# Altium footprint library HC_HC-FPC-0.5-8P-FH20.PcbLib: 1 footprints
Each footprint in its own frame and in the unit in brackets; x right, y up, seen from the top. Pads: shape width x height; smd on the part's side, far side on the other; paste and mask are expansions set on the pad; w line width, h text height; cw(c..) or ccw(c..) is an arc to the next point about the centre after c.
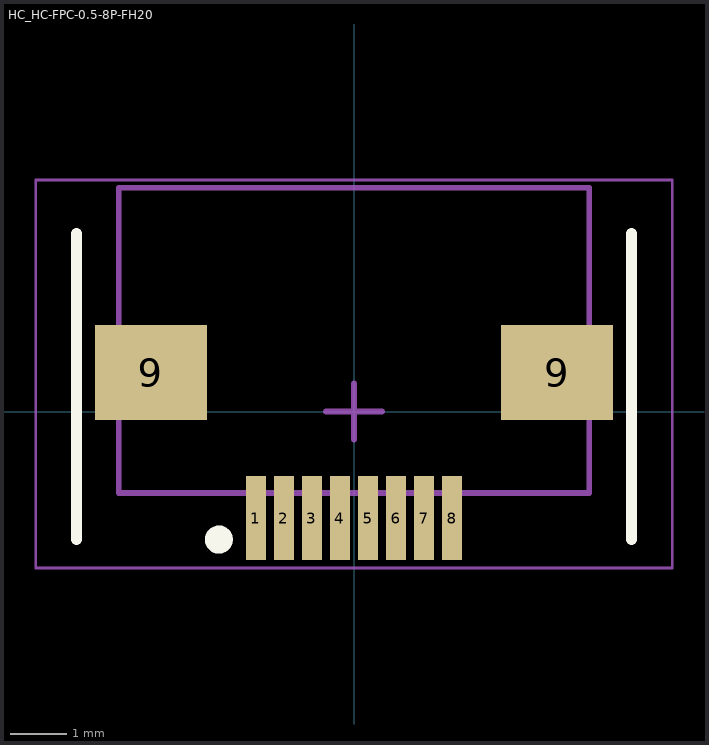
[diagram p0: the footprint, top view; thin cyan lines are the x and y axes]

## HC_HC-FPC-0.5-8P-FH20 [mm]
height 2.15
pads (10):
  rect 0.35x1.5 smd: 1(-1.75,-1.905) 2(-1.25,-1.905) 3(-0.75,-1.905) 4(-0.25,-1.905) 5(0.25,-1.905) 6(0.75,-1.905) 7(1.25,-1.905) 8(1.75,-1.905)
  rect 2x1.7 smd: 9(-3.625,0.695) 9(3.625,0.695)
Top Overlay:
  circle w0.25: c-2.413,-2.286 r0.125
  lines w0.2: -4.953,-2.286 -4.953,3.175 ; 4.953,-2.286 4.953,3.175
Mechanical 13:
  lines w0.1: -4.2,-1.455 4.2,-1.455 4.2,3.995 -4.2,3.995 -4.2,-1.455
Mechanical 15:
  lines w0.05: -5.68,-2.794 -5.68,4.133 5.68,4.133 5.68,-2.794 -5.68,-2.794
  lines w0.1: -0.5,0 0.5,0 ; 0,-0.5 0,0.5
3D body "FFC2B35-08-T.STEP": height 2.01, standoff 0.01, extent -4.2,-2.399 4.2,4.361